# Altium footprint library Biblioteka.PcbLib: 55 footprints (part 4 of 4)
Each footprint in its own frame and in the unit in brackets; x right, y up, seen from the top. Pads: shape width x height; smd on the part's side, far side on the other; paste and mask are expansions set on the pad; w line width, h text height; cw(c..) or ccw(c..) is an arc to the next point about the centre after c.
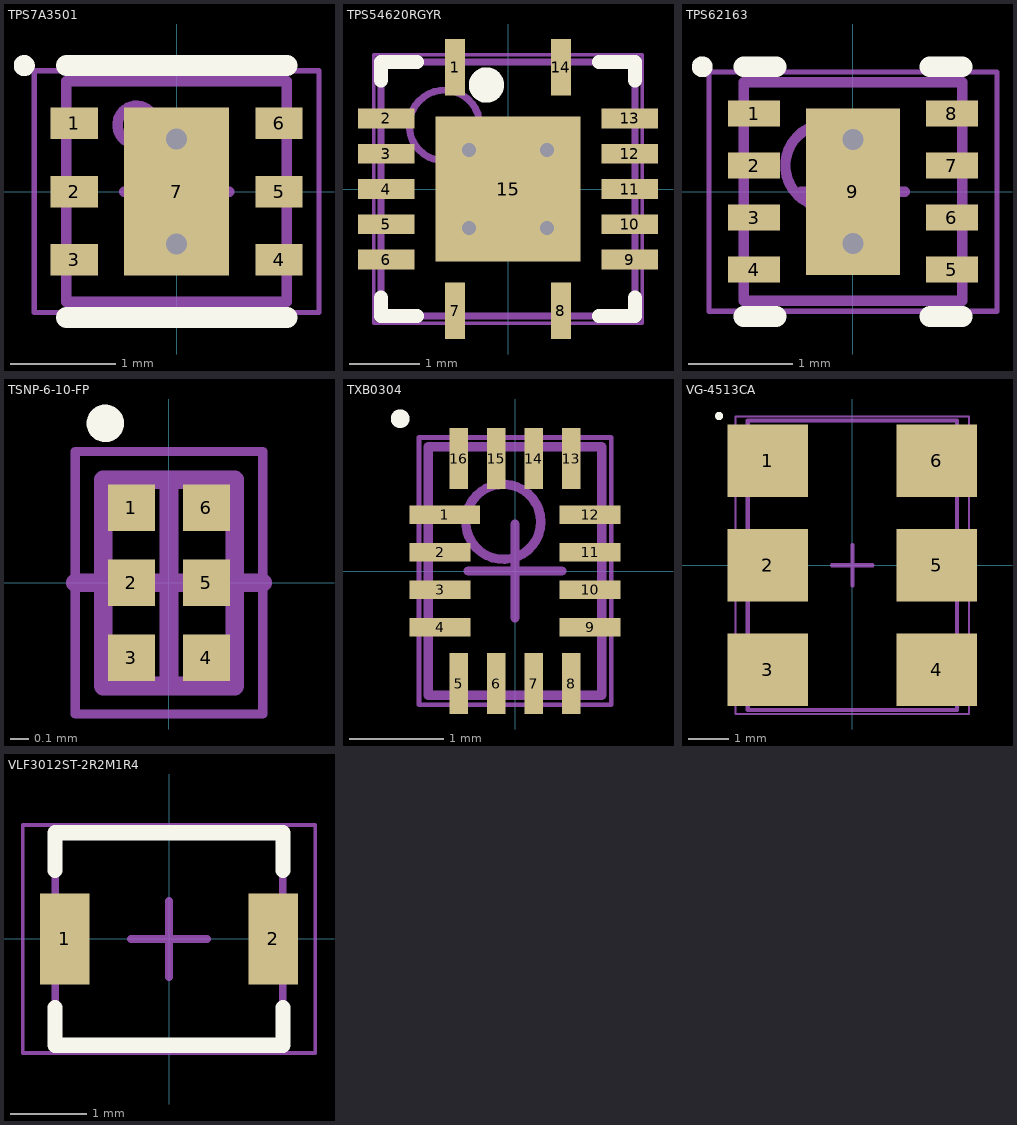
[diagram p3: the footprints below, top view; thin cyan lines are the x and y axes]

## TPS7A3501 [mm] "6-WDFN Exposed Pad"
height 0.8
pads (7):
  rect 0.45x0.3 smd: 1(-0.975,0.65) 2(-0.975,0) 3(-0.975,-0.65) 4(0.975,-0.65) 5(0.975,0) 6(0.975,0.65)
  rect 1x1.6 smd: 7(0,0)
via 0,0.5 diameter 0.5 hole 0.2
via 0,-0.5 diameter 0.5 hole 0.2
Top Overlay:
  circle w0.1: c-1.45,1.2 r0.05
  lines w0.2: -1.05,-1.2 1.05,-1.2 ; -1.05,1.2 1.05,1.2
Mechanical 13:
  circle w0.1: c-0.381,0.635 r0.182
  lines w0.1: -1.05,-1.05 1.05,-1.05 1.05,1.05 -1.05,1.05 -1.05,-1.05
Mechanical 15:
  lines w0.05: -1.355,-1.15 1.355,-1.15 1.355,1.15 -1.355,1.15 -1.355,-1.15
  lines w0.1: -0.5,0 0.5,0 ; 0,-0.5 0,0.5
3D body "TPS7A3501.step": height 0.8, standoff 0, extent -1.13,-1.05 1.13,1.05

## TPS54620RGYR [mm] "14-VFQFN Exposed Pad"
height 1
pads (15):
  rect 0.28x0.8 smd: 1(-0.75,1.725) 7(-0.75,-1.725) 8(0.75,-1.725) 14(0.75,1.725)
  rect 0.8x0.28 smd: 2(-1.725,1) 3(-1.725,0.5) 4(-1.725,0) 5(-1.725,-0.5) 6(-1.725,-1) 9(1.725,-1) 10(1.725,-0.5) 11(1.725,0) 12(1.725,0.5) 13(1.725,1)
  rect 2.05x2.05 smd: 15(0,0)
via 0.55,-0.55 diameter 0.5 hole 0.2
via 0.55,0.55 diameter 0.5 hole 0.2
via -0.55,-0.55 diameter 0.5 hole 0.2
via -0.55,0.55 diameter 0.5 hole 0.2
Top Overlay:
  circle w0.25: c-0.305,1.473 r0.125
  lines w0.2: -1.8,-1.54 -1.8,-1.8 -1.29,-1.8 ; -1.8,1.54 -1.8,1.8 -1.29,1.8 ; 1.29,-1.8 1.8,-1.8 1.8,-1.54 ; 1.29,1.8 1.8,1.8 1.8,1.54
Mechanical 13:
  circle w0.1: c-0.9,0.9 r0.5
  lines w0.1: -1.8,-1.8 -1.8,1.8 1.8,1.8 1.8,-1.8 -1.8,-1.8
Mechanical 15:
  lines w0.05: -1.9,-1.9 -1.9,1.9 1.9,1.9 1.9,-1.9 -1.9,-1.9
  lines w0.1: -0.5,0 0.5,0 ; 0,-0.5 0,0.5
3D body "TPS54620RGYR.step": height 1, standoff 0, extent -1.8,-1.8 1.8,1.8

## TPS62163 [mm] "DSG0008A WSON - 0.8 mm max height"
height 0.8
pads (9):
  rect 0.5x0.25 smd: 1(-0.95,0.75) 2(-0.95,0.25) 3(-0.95,-0.25) 4(-0.95,-0.75) 5(0.95,-0.75) 6(0.95,-0.25) 7(0.95,0.25) 8(0.95,0.75)
  rect 0.9x1.6 smd: 9(0,0)
via 0,-0.5 diameter 0.5 hole 0.2
via 0,0.5 diameter 0.5 hole 0.2
Top Overlay:
  circle w0.1: c-1.45,1.2 r0.05
  lines w0.2: -1.05,-1.2 -0.74,-1.2 ; -1.05,1.2 -0.74,1.2 ; 0.74,-1.2 1.05,-1.2 ; 0.74,1.2 1.05,1.2
Mechanical 13:
  circle w0.1: c-0.25,0.25 r0.4
  lines w0.1: -1.05,-1.05 1.05,-1.05 1.05,1.05 -1.05,1.05 -1.05,-1.05
Mechanical 15:
  lines w0.05: -1.385,-1.15 1.385,-1.15 1.385,1.15 -1.385,1.15 -1.385,-1.15
  lines w0.1: -0.5,0 0.5,0 ; 0,-0.5 0,0.5
3D body "TPS62163.step": height 0.8, standoff 0, extent -1.1,-1.05 1.1,1.05

## TSNP-6-10-FP [mm] "TSNP-6-10-FP, SOTFL, 6-Leads, Body 1,10x0,80mm, Pitch 0,40mm, IPC Medium Density"
height 0.37
pads (6):
  rect 0.25x0.25 smd: 1(-0.2,0.4) 2(-0.2,0) 3(-0.2,-0.4) 4(0.2,-0.4) 5(0.2,0) 6(0.2,0.4)
Top Overlay:
  circle w0.1: c-0.34,0.85 r0.05
Mechanical 13:
  lines w0.1: -0.35,-0.55 0.35,-0.55 0.35,0.55 -0.35,0.55 -0.35,-0.55
Mechanical 15:
  lines w0.05: -0.5,-0.7 0.5,-0.7 0.5,0.7 -0.5,0.7 -0.5,-0.7
  lines w0.1: -0.5,0 0.5,0 ; 0,-0.5 0,0.5
3D body "TSNP-6-10-FP.step": height 0.37, standoff 0, extent -0.4,-0.548 0.4,0.548

## TXB0304 [mm] "RSV0016A UQFN - 0.55 mm max height"
height 0.55
pads (16):
  rect 0.75x0.2 smd mask+0.05: 1(-0.75,0.6)
  rect 0.65x0.2 smd mask+0.05: 2(-0.8,0.2) 3(-0.8,-0.2) 4(-0.8,-0.6) 9(0.8,-0.6) 10(0.8,-0.2) 11(0.8,0.2) 12(0.8,0.6)
  rect 0.2x0.65 smd mask+0.05: 5(-0.6,-1.2) 6(-0.2,-1.2) 7(0.2,-1.2) 8(0.6,-1.2) 13(0.6,1.2) 14(0.2,1.2) 15(-0.2,1.2) 16(-0.6,1.2)
Top Overlay:
  circle w0.1: c-1.225,1.625 r0.05
Mechanical 13:
  circle w0.1: c-0.125,0.525 r0.4
  lines w0.1: -0.925,-1.325 0.925,-1.325 0.925,1.325 -0.925,1.325 -0.925,-1.325
Mechanical 15:
  lines w0.05: -1.025,-1.425 1.025,-1.425 1.025,1.425 -1.025,1.425 -1.025,-1.425
  lines w0.1: -0.5,0 0.5,0 ; 0,-0.5 0,0.5
3D body "TXB0304.step": height 0.55, standoff 0, extent -0.925,-1.325 0.925,1.325

## VG-4513CA [mm] "SON, 6-Leads, Body 7,00x5,00mm, Pitch 2,60mm, IPC High Density"
height 1.8
pads (6):
  rect 2x1.8 smd: 1(-2.1,2.6) 2(-2.1,0) 3(-2.1,-2.6) 4(2.1,-2.6) 5(2.1,0) 6(2.1,2.6)
Top Overlay:
  circle w0.1: c-3.312,3.712 r0.05
Mechanical 13:
  circle w0.1: c-1.7,2.7 r0.5
  lines w0.1: -2.6,-3.6 -2.6,3.6 2.6,3.6 2.6,-3.6 -2.6,-3.6
Mechanical 15:
  lines w0.05: -2.905,-3.7 -2.905,3.7 2.905,3.7 2.905,-3.7 -2.905,-3.7
  lines w0.1: -0.5,0 0.5,0 ; 0,-0.5 0,0.5
3D body "VG-4513CA.step": height 1.8, standoff 0.1, extent -2.6,-3.6 2.6,3.6

## VLF3012ST-2R2M1R4 [mm] "Precision Wire Wound Inductor, 2-Leads, Body 3.00x2.80mm, IPC High Density"
height 1.2
pads (2):
  rect 0.65x1.2 smd: 1(-1.375,0) 2(1.375,0)
Top Overlay:
  lines w0.2: -1.5,-0.9 -1.5,-1.4 1.5,-1.4 1.5,-0.9 ; -1.5,0.9 -1.5,1.4 1.5,1.4 1.5,0.9
Mechanical 13:
  lines w0.1: -1.5,-1.4 1.5,-1.4 1.5,1.4 -1.5,1.4 -1.5,-1.4
Mechanical 15:
  lines w0.05: -1.925,-1.5 1.925,-1.5 1.925,1.5 -1.925,1.5 -1.925,-1.5
  lines w0.1: -0.5,0 0.5,0 ; 0,-0.5 0,0.5
3D body "VLF3012ST-2R2M1R4.step": height 1.3, standoff 0, extent -1.6,-1.4 1.6,1.4